# Altium integrated library Francisco_Lib.IntLib: 77 symbols (part 2 of 3)
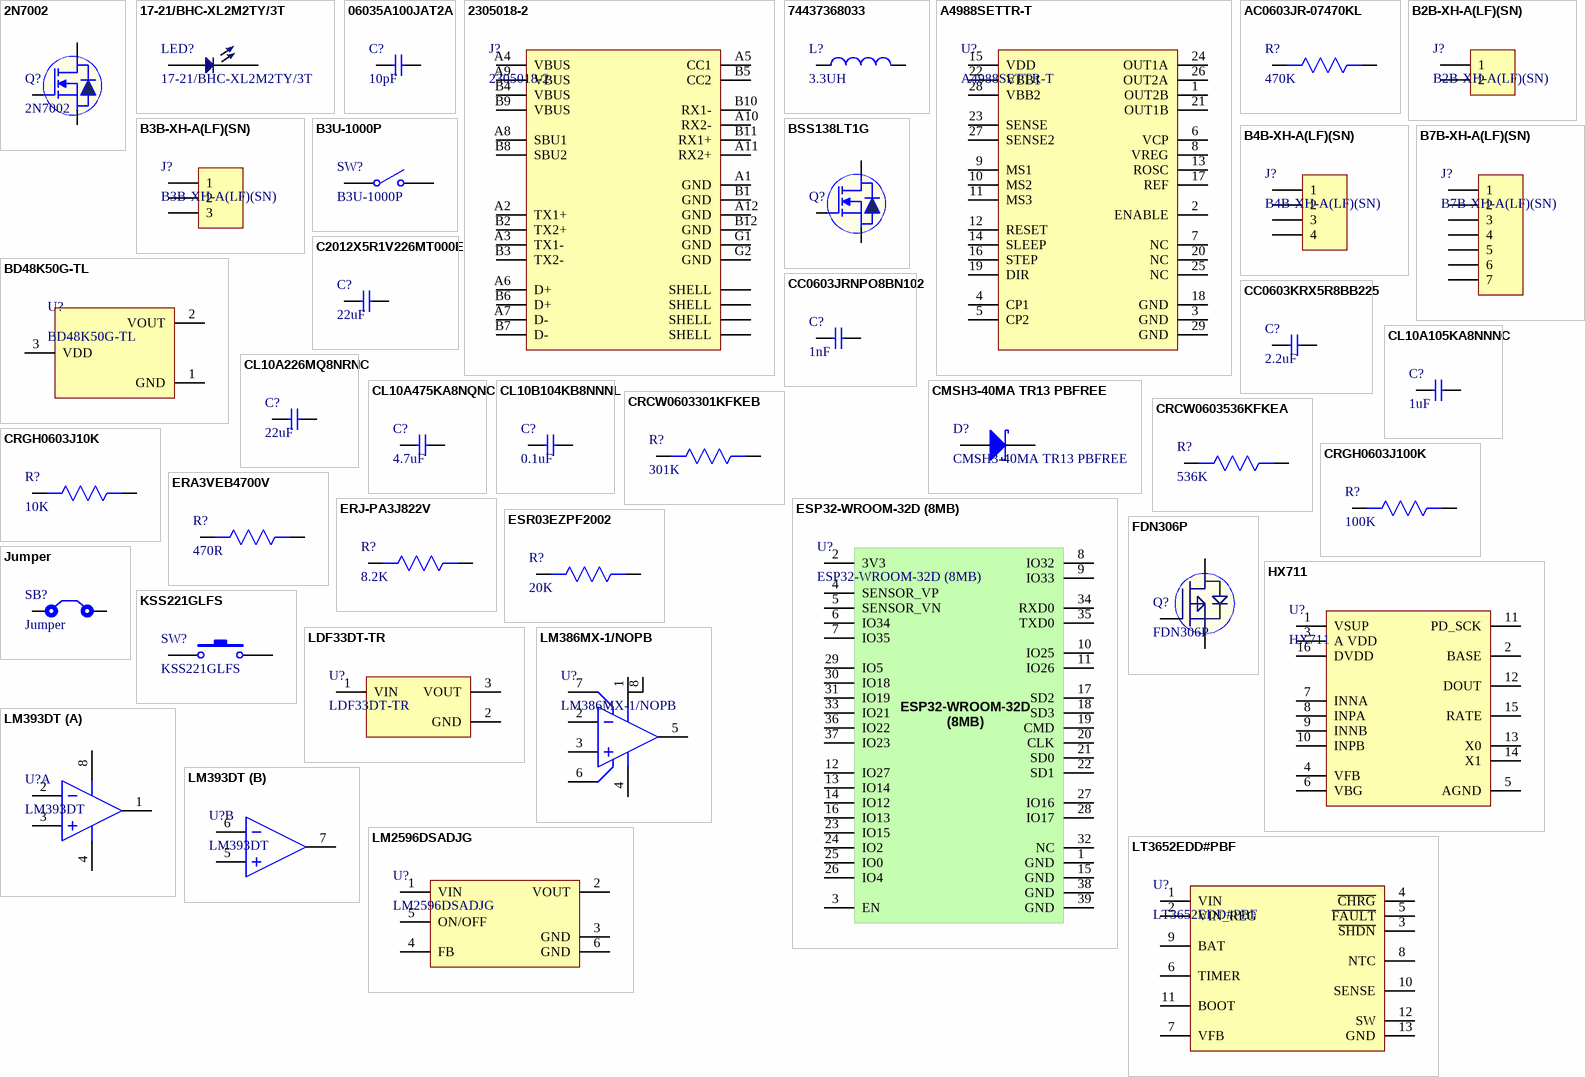
[diagram p2: symbols 2N7002 to LT3652EDD#PBF]

## ESP32-WROOM-32D (8MB)
designator U?
RX TXRX MOD WIFI TRACE ANT SMD; Manufacturer: Espressif Systems; Interface: I2C,SPI,GPIO,PWM,SDIO,UART; Frequency: 2.5GHz; Data Rate: 150Mbps; Sensitivity: -98dBm; Memory Size: 536KB; Supplier 1: Digi-Key; Manufacturer Part Number: ESP32-WROOM-32D (8MB); RoHS: No; Stock 1: 2044; Pricing 1: 1=4.35000 (USD); Mount: Surface Mount; Case/Package: SMD/SMT; Min Operating Temperature: -40°C; Max Operating Temperature: 85°C; Packaging: Tape and Reel; ComponentLink1URL: https://www.espressif.com/sites/default/files/documentation/esp32-wroom-32d_esp32-wroom-32u_datasheet_en.pdf?src-supplier=Digi-Key; ComponentLink1Description: https://www.espressif.com/sites/default/files/documentation/esp32-wroom-32d_esp32-wroom-32u_datasheet_en.pdf?src-supplier=Digi-Key; Supplier Part Number 1: 1904-1024-1-ND
footprint ESP32-WROOM-32D (8MB)
pins: 1 GND, 2 3V3, 3 EN, 4 SENSOR_VP, 5 SENSOR_VN, 6 IO34, 7 IO35, 8 IO32, 9 IO33, 10 IO25, 11 IO26, 12 IO27, 13 IO14, 14 IO12, 15 GND, 16 IO13, 17 SD2, 18 SD3, 19 CMD, 20 CLK, 21 SD0, 22 SD1, 23 IO15, 24 IO2, 25 IO0, 26 IO4, 27 IO16, 28 IO17, 29 IO5, 30 IO18, 31 IO19, 32 NC, 33 IO21, 34 RXD0, 35 TXD0, 36 IO22, 37 IO23, 38 GND, 39 GND
text: ESP32-WROOM-32D (8MB) /

## ESR03EZPF2002
designator R?, comment 20K
RES SMD 20K OHM 1% 1/4W 0603; Manufacturer: Rohm; Manufacturer Part Number: ESR03EZPF2002; Resistance: 20kR; Max Power Dissipation: 250mW; Temperature Coefficient: 100ppm/°C; Supplier 1: Digi-Key; Stock 1: 4737; Pricing 1: 1=0.13, 10=0.12, 100=0.046, 1000=0.02024, 2500=0.01748 (USD); Case/Package: 0603; Case Code (Metric): 1608; Case Code (Imperial): 0603; Min Operating Temperature: -55°C; Max Operating Temperature: 155°C; Package Quantity: 1; Tolerance: 1%; Packaging: Tape and Reel; Resistor Type: Thick Film; Number of Terminations: 2; Features: Automotive AEC-Q200; Series: ESR; Length: 0.063inch; Width: 0.031inch; Height: 0.022inch; RoHS Compliant: Yes; ComponentLink1URL: https://www.rohm.com/datasheet/ESR01MZPF/esr-e?src-supplier=Digi-Key; ComponentLink1Description: https://www.rohm.com/datasheet/ESR01MZPF/esr-e?src-supplier=Digi-Key; Supplier Part Number 1: RHM20.0KADCT-ND
footprint RES-0603
pins: 1, 2

## FDN306P
designator Q?
MOSFET P-CH 12V 2.6A SUPERSOT3; Manufacturer: ON Semiconductor / Fairchild; Rds On Max: 40mR; Input Capacitance: 1.138nF; Max Power Dissipation: 500mW; Gate to Source Voltage (Vgs): 8V; Number of Elements: 1; Turn-Off Delay Time: 38ns; Turn-On Delay Time: 11ns; Element Configuration: Single; Rise Time: 10ns; Threshold Voltage: -600mV; Drain to Source Breakdown Voltage: -12V; Polarity: P-CHANNEL; Current Rating: -2.6A; Current: 26A; Supplier 1: Digi-Key; Manufacturer Part Number: FDN306P; RoHS: Yes; Category: MOSFETs; Stock 1: 12409; Pricing 1: 1=0.59000, 10=0.50700, 25=0.47360, 100=0.37880, 500=0.29766, 1000=0.23001 (USD); Mount: Surface Mount; Case/Package: TO-236-3; Number of Pins: 3; Contact Plating: Tin,Matte; Min Operating Temperature: -55°C; Max Operating Temperature: 150°C; Packaging: Tape and Reel; Package Quantity: 3000; Drain to Source Voltage (Vdss): 12V; Continuous Drain Current (ID): 2.6A; Drain to Source Resistance: 40mR; Power Dissipation: 500mW; Series: PowerTrench®; Fall Time: 10ns; Nominal Vgs: -600mV; On-State Resistance: 40MR; Drain-source On Resistance-Max: 40MR; Dual Supply Voltage: -12V; Termination: SMD/SMT; Voltage Rating (DC): -12V; Voltage: 12V; Length: 2.92mm; Width: 1.4mm; Height: 0.94mm; Radiation Hardening: No; REACH SVHC: No SVHC; RoHS Compliant: Yes; Lead Free: Lead Free; ComponentLink1URL: https://datasheet.ciiva.com/6383/fdn306p-6383301.pdf?src-supplier=Digi-Key; ComponentLink1Description: https://datasheet.ciiva.com/6383/fdn306p-6383301.pdf?src-supplier=Digi-Key; ComponentLink2URL: https://datasheet.ciiva.com/4439/fdn306p-50876-4439911.pdf?src-supplier=Mouser; ComponentLink2Description: https://datasheet.ciiva.com/4439/fdn306p-50876-4439911.pdf?src-supplier=Mouser; ComponentLink3URL: https://datasheet.ciiva.com/27050/889760-27050636.pdf?src-supplier=Jameco; ComponentLink3Description: https://datasheet.ciiva.com/27050/889760-27050636.pdf?src-supplier=Jameco; ComponentLink4URL: https://datasheet.ciiva.com/14170/fdn306p-eng-tds-14170925.pdf?src-supplier=Distrelec; ComponentLink4Description: https://datasheet.ciiva.com/14170/fdn306p-eng-tds-14170925.pdf?src-supplier=Distrelec; ComponentLink5URL: https://datasheet.ciiva.com/22700/264983-22700885.pdf?src-supplier=Element14; ComponentLink5Description: https://datasheet.ciiva.com/22700/264983-22700885.pdf?src-supplier=Element14; ComponentLink6URL: https://datasheet.ciiva.com/26144/fdn306p-26144214.pdf?src-supplier=Avnet+Europe; ComponentLink6Description: https://datasheet.ciiva.com/26144/fdn306p-26144214.pdf?src-supplier=Avnet+Europe; ComponentLink7URL: https://datasheet.ciiva.com/6383/fdn306p-6383304.pdf?src-supplier=Digi-Key; ComponentLink7Description: https://datasheet.ciiva.com/6383/fdn306p-6383304.pdf?src-supplier=Digi-Key; ComponentLink8URL: https://datasheet.ciiva.com/11175/fdn306p-11175160.pdf?src-supplier=Avnet; ComponentLink8Description: https://datasheet.ciiva.com/11175/fdn306p-11175160.pdf?src-supplier=Avnet; ComponentLink9URL: https://datasheet.ciiva.com/6383/fdn306p-6383306.pdf?src-supplier=Digi-Key; ComponentLink9Description: https://datasheet.ciiva.com/6383/fdn306p-6383306.pdf?src-supplier=Digi-Key; ComponentLink10URL: https://datasheet.ciiva.com/17275/fdn306p-17275114.pdf?src-supplier=Future+Electronics; ComponentLink10Description: https://datasheet.ciiva.com/17275/fdn306p-17275114.pdf?src-supplier=Future+Electronics; ComponentLink11URL: https://datasheet.ciiva.com/22655/fdn306p-22655327.pdf?src-supplier=Element14; ComponentLink11Description: https://datasheet.ciiva.com/22655/fdn306p-22655327.pdf?src-supplier=Element14; Supplier Part Number 1: FDN306PCT-ND
footprint SuperSOT-3
pins: 1 G, 2 S, 3 D

## HX711
designator U?
LOAD CELL AMP HX711; Manufacturer Part No: HX711; Package: SOP-16L
footprint HX711
pins: 1 VSUP, 2 BASE, 3 A VDD, 4 VFB, 5 AGND, 6 VBG, 7 INNA, 8 INPA, 9 INNB, 10 INPB, 11 PD_SCK, 12 DOUT, 13 X0, 14 X1, 15 RATE, 16 DVDD

## Jumper
designator SB?
footprint Jumper
pins: 1, 2

## KSS221GLFS
designator SW?
SWITCH TACTILE SPST-NO 0.05A 50V; Manufacturer: ITT C&K; Mechanical Life: 100000Cycles; Throw Configuration: SPST; Operating Force: 2N; Max Current Rating: 50mA; Max Voltage Rating (DC): 32V; Contact Resistance: 100mR; Power Rating: 1W; Illumination Type: Non-Illuminated,Illuminated; Insulation Resistance: 1GR; Switch Travel: 0.3mm; Switch Function: Off-Mom; Actuator Length: 0.8mm; IP Rating: IP40; Supplier 1: Digi-Key; Manufacturer Part Number: KSS221GLFS; Stock 1: 17242; Pricing 1: 1=0.68, 10=0.655, 25=0.6424, 50=0.6182, 100=0.5334, 250=0.4849, 500=0.4607, 1000=0.3637 (USD); Mount: Surface Mount; Contact Material: Silver; Contact Plating: Silver; Min Operating Temperature: -40°C; Max Operating Temperature: 85°C; Termination: Gull Wing; Packaging: Tape and Reel; Package Quantity: 1; Contact Current Rating: 50mA; Current Rating: 50mA; Voltage Rating (DC): 32V; Orientation: Right Angle; Length: 4.5mm; Width: 7mm; Depth: 4.4mm; Radiation Hardening: No; REACH SVHC: No SVHC; Lead Free: Lead Free; ComponentLink1URL: https://datasheet.ciiva.com/26917/getdatasheetpartid-773364-26917575.pdf; ComponentLink1Description: https://datasheet.ciiva.com/26917/getdatasheetpartid-773364-26917575.pdf; ComponentLink2URL: https://datasheet.ciiva.com/30466/0900766b8129cd37-30466697.pdf; ComponentLink2Description: https://datasheet.ciiva.com/30466/0900766b8129cd37-30466697.pdf; ComponentLink3URL: https://datasheet.ciiva.com/16496/kss221g20lfs-16496166.pdf; ComponentLink3Description: https://datasheet.ciiva.com/16496/kss221g20lfs-16496166.pdf; ComponentLink4URL: https://datasheet.ciiva.com/18145/getdatasheetpartid-313005-18145235.pdf; ComponentLink4Description: https://datasheet.ciiva.com/18145/getdatasheetpartid-313005-18145235.pdf; ComponentLink5URL: https://datasheet.ciiva.com/16155/kss221glfs-ckcomponents-16155741.pdf; ComponentLink5Description: https://datasheet.ciiva.com/16155/kss221glfs-ckcomponents-16155741.pdf; ComponentLink6URL: https://datasheet.ciiva.com/5684/19445-5684460.pdf; ComponentLink6Description: https://datasheet.ciiva.com/5684/19445-5684460.pdf; ComponentLink7URL: https://datasheet.ciiva.com/2900/kss-2900345.pdf; ComponentLink7Description: https://datasheet.ciiva.com/2900/kss-2900345.pdf; ComponentLink8URL: https://datasheet.ciiva.com/2900/kss-2900343.pdf; ComponentLink8Description: https://datasheet.ciiva.com/2900/kss-2900343.pdf; ComponentLink9URL: https://datasheet.ciiva.com/7986/19445-7986997.pdf; ComponentLink9Description: https://datasheet.ciiva.com/7986/19445-7986997.pdf; ComponentLink10URL: https://datasheet.ciiva.com/2900/kss-2900344.pdf; ComponentLink10Description: https://datasheet.ciiva.com/2900/kss-2900344.pdf; Supplier Part Number 1: 401-1097-6-ND
footprint KSS221GLFS
pins: 1, 2

## LDF33DT-TR
designator U?
IC REG LINEAR 3.3V 1A DPAK; Manufacturer: STMicroelectronics; Number of Outputs: 1; Min Input Voltage: 2.6V; Max Input Voltage: 16V; Dropout Voltage: 200mV; Polarity: Positive; Quiescent Current: 800uA; Accuracy: 2%; Operating Supply Current: 200uA; Power Supply Rejection Ratio (PSRR): 60dB; Output Type: Fixed; Supplier 1: Digi-Key; Manufacturer Part Number: LDF33DT-TR; Stock 1: 6958; Pricing 1: 1=0.99, 10=0.868, 25=0.8148, 100=0.6178, 250=0.52576, 500=0.49948, 1000=0.434 (USD); Mount: Surface Mount; Case/Package: TO-252-3; Number of Pins: 3; Weight: 0.012346oz; Min Operating Temperature: -40°C; Max Operating Temperature: 125°C; Packaging: Tape and Reel; Max Output Current: 1A; Output Voltage: 3.3V; Nominal Output Voltage: 3.3V; Output Current: 1A; Number of Regulators: 1; Package Quantity: 2500; Radiation Hardening: No; REACH SVHC: No SVHC; Lead Free: Lead Free; RoHS Compliant: Yes; ComponentLink1URL: http://www.st.com/st-web-ui/static/active/en/resource/technical/document/datasheet/DM00099995.pdf?src-supplier=Avnet; ComponentLink1Description: http://www.st.com/st-web-ui/static/active/en/resource/technical/document/datasheet/DM00099995.pdf?src-supplier=Avnet; Supplier Part Number 1: 497-14661-6-ND
footprint LDF33DT-TR
pins: 1 VIN, 2 GND, 3 VOUT

## LM386MX-1/NOPB
designator U?
IC AMP AUDIO PWR .325W AB 8SOIC; Manufacturer: TI National Semiconductor; Min Supply Voltage: 4V; Max Supply Voltage: 12V; Power Supply Rejection Ratio (PSRR): 50dB; Number of Channels: 1; Output Power: 325mW; Voltage Gain: 46dB; Supply Type: Single; Load Impedance: 8R; Operating Supply Voltage: 9V; Max Power Dissipation: 730mW; Nominal Supply Current: 4mA; Gain: 20dB; Input Bias Current: 250nA; Bandwidth: 300kHz; ComponentLink1URL: http://www.ti.com/lit/ds/symlink/lm4673.pdf?src-supplier=Avnet; ComponentLink1Description: http://www.ti.com/lit/ds/symlink/lm4673.pdf?src-supplier=Avnet; ComponentLink2URL: http://www.ti.com/lit/ds/symlink/lm4673.pdf?src-supplier=Digi-Key; ComponentLink2Description: http://www.ti.com/lit/ds/symlink/lm4673.pdf?src-supplier=Digi-Key; ComponentLink3URL: http://www.produktinfo.conrad.com/datenblaetter/1000000-1099999/001071168-da-01-en-IC_AMP_AUDI_PWR_LM4673SD_NOPB_WSON_8_TID.pdf?src-supplier=Conrad; ComponentLink3Description: http://www.produktinfo.conrad.com/datenblaetter/1000000-1099999/001071168-da-01-en-IC_AMP_AUDI_PWR_LM4673SD_NOPB_WSON_8_TID.pdf?src-supplier=Conrad; Supplier 1: Digi-Key; Manufacturer Part Number: LM386MX-1/NOPB; RoHS: Yes; Category: Amplifiers - Audio; Stock 1: 11730; Pricing 1: 1=1.08000, 10=0.96300, 25=0.91400, 100=0.75090, 250=0.70192, 500=0.62032, 1000=0.51436 (USD); Case/Package: D; Number of Pins: 8; Contact Plating: Tin,Matte; Min Operating Temperature: 0°C; Max Operating Temperature: 70°C; Packaging: Tape and Reel; Package Quantity: 2500; Max Output Power: 325mW; Series: LM386; Power Dissipation: 730mW; Supply Current: 4mA; Radiation Hardening: No; REACH SVHC: No SVHC; Lead Free: Lead Free; RoHS Compliant: Yes; ComponentLink4URL: https://datasheet.ciiva.com/27051/1282302-27051816.pdf?src-supplier=Jameco; ComponentLink4Description: https://datasheet.ciiva.com/27051/1282302-27051816.pdf?src-supplier=Jameco; ComponentLink5URL: https://datasheet.ciiva.com/15132/getdatasheetpartid-145250-15132457.pdf?src-supplier=Verical; ComponentLink5Description: https://datasheet.ciiva.com/15132/getdatasheetpartid-145250-15132457.pdf?src-supplier=Verical; ComponentLink6URL: https://datasheet.ciiva.com/1482/1640767-1482306.pdf?src-supplier=Element14; ComponentLink6Description: https://datasheet.ciiva.com/1482/1640767-1482306.pdf?src-supplier=Element14; ComponentLink7URL: https://datasheet.ciiva.com/6625/lm386-6625407.pdf?src-supplier=Digi-Key; ComponentLink7Description: https://datasheet.ciiva.com/6625/lm386-6625407.pdf?src-supplier=Digi-Key; Supplier Part Number 1: LM386MX-1/NOPBCT-ND
footprint LM386MX-1/NOPB
pins: 1 GAIN, 2 IN-, 3 IN+, 4 GND, 5 OUT, 6 VS, 7 Bypass, 8 GAIN

## LM393DT
designator U?
IC COMPARATOR LP DUAL 8-SOIC; Manufacturer: STMicroelectronics; Nominal Supply Current: 1mA; Voltage Gain: 106.02dB; Min Supply Voltage: 2V; Max Supply Voltage: 36V; Min Dual Supply Voltage: 1V; Max Dual Supply Voltage: 18V; Number of Channels: 2; Output Current: 18mA; Quiescent Current: 2.5mA; Input Offset Voltage (Vos): 5mV; Input Bias Current: 250nA; Output Current per Channel: 100pA; Response Time: 1.3us; Output Type: TTL; Operating Supply Voltage: 28V; Dual Supply Voltage: 9V; Max Power Dissipation: 710mW; Natural Thermal Resistance: 125°C/W; Supplier 1: Digi-Key; Manufacturer Part Number: LM393DT; Stock 1: 46251; Pricing 1: 1=0.48, 10=0.358, 25=0.3136, 100=0.1792, 250=0.168, 500=0.1344, 1000=0.10304 (USD); Mount: Surface Mount; Case/Package: SO; Number of Pins: 8; Weight: 0.01lb; Contact Plating: Gold; Min Operating Temperature: 0°C; Max Operating Temperature: 70°C; Packaging: Tape and Reel; Package Quantity: 2500; Number of Elements: 2; Max Supply Current: 1mA; Max Input Current: 250nA; Type: General Purpose; Propagation Delay: 1.3us; Turn-On Delay Time: 1.3us; Length: 4.9mm; Height: 1.25mm; Width: 3.9mm; Radiation Hardening: No; REACH SVHC: No SVHC; Lead Free: Lead Free; ComponentLink1URL: http://www.st.com/content/ccc/resource/technical/document/datasheet/group1/b4/cc/cf/13/18/28/44/f5/CD00000465/files/CD00000465.pdf/jcr:content/translations/en.CD00000465.pdf?src-supplier=Digi-Key; ComponentLink1Description: http://www.st.com/content/ccc/resource/technical/document/datasheet/group1/b4/cc/cf/13/18/28/44/f5/CD00000465/files/CD00000465.pdf/jcr:content/translations/en.CD00000465.pdf?src-supplier=Digi-Key; ComponentLink2URL: https://www.verical.com/server-webapp/html/getDatasheet?partID=302604&src-supplier=Verical; ComponentLink2Description: https://www.verical.com/server-webapp/html/getDatasheet?partID=302604&src-supplier=Verical; ComponentLink3URL: http://www.st.com/st-web-ui/static/active/en/resource/technical/document/datasheet/CD00000465.pdf?src-supplier=Avnet; ComponentLink3Description: http://www.st.com/st-web-ui/static/active/en/resource/technical/document/datasheet/CD00000465.pdf?src-supplier=Avnet; ComponentLink4URL: http://www.mouser.com/ds/2/389/lm193-955038.pdf?src-supplier=Mouser; ComponentLink4Description: http://www.mouser.com/ds/2/389/lm193-955038.pdf?src-supplier=Mouser; ComponentLink5URL: http://www.farnell.com/datasheets/2291162.pdf?src-supplier=Element14; ComponentLink5Description: http://www.farnell.com/datasheets/2291162.pdf?src-supplier=Element14; ComponentLink6URL: https://www.distrelec.biz/Web/Downloads/_e/ng/LM393_ST_tds_eng.pdf?mime=application%2Fpdf&src-supplier=Distrelec; ComponentLink6Description: https://www.distrelec.biz/Web/Downloads/_e/ng/LM393_ST_tds_eng.pdf?mime=application%2Fpdf&src-supplier=Distrelec; ComponentLink7URL: http://www.st.com/web/en/resource/technical/document/datasheet/CD00000465.pdf?src-supplier=Future+Electronics; ComponentLink7Description: http://www.st.com/web/en/resource/technical/document/datasheet/CD00000465.pdf?src-supplier=Future+Electronics; ComponentLink8URL: http://datasheet.iiic.cc/stmicroelectronics/LM393DT.pdf?src-supplier=IIIC; ComponentLink8Description: http://datasheet.iiic.cc/stmicroelectronics/LM393DT.pdf?src-supplier=IIIC; Supplier Part Number 1: 497-1593-1-ND
footprint LM393DT
part A pins: 1 OUT1, 2 IN1-, 3 IN1+, 4 V- (power), 8 V+ (power)
part B pins: 5 IN2+, 6 IN2-, 7 OUT2

## LM2596DSADJG
designator U?
IC REG MULT CONFG ADJ 3A D2PAK-5; Manufacturer: ON Semiconductor; Max Input Voltage: 40V; Output Voltage: 37V; Number of Outputs: 1; Efficiency: 73%; Min Input Voltage: 4.5V; Switching Frequency: 150kHz; Synchronous Rectifier: No; Min Output Voltage: 1.23V; Output Type: Adjustable; Supplier 1: Digi-Key; Manufacturer Part Number: LM2596DSADJG; Stock 1: 0; Pricing 1: 1=2.49, 10=2.237, 25=2.11, 100=1.7979, 250=1.68816, 500=1.47714, 1000=1.22391, 2500=1.19445 (USD); Mount: Surface Mount; Case/Package: TO-263-5; Number of Pins: 5; Contact Plating: Tin,Matte; Weight: 0.070548oz; Min Operating Temperature: -40°C; Max Operating Temperature: 125°C; Output Current: 3A; Package Quantity: 50; Packaging: Rail/Tube; Max Output Current: 3A; Max Output Voltage: 37V; Operating Supply Voltage: 40V; Series: LM2596; Length: 10.24mm; Width: 4.572mm; Height: 9.347mm; Radiation Hardening: No; REACH SVHC: No SVHC; Lead Free: Lead Free; Halogen Free: Halogen Free; RoHS Compliant: Yes; ComponentLink1URL: http://www.mouser.com/ds/2/308/LM2596-D-106251.pdf?src-supplier=Mouser; ComponentLink1Description: http://www.mouser.com/ds/2/308/LM2596-D-106251.pdf?src-supplier=Mouser; ComponentLink2URL: http://www.onsemi.com/pub_link/Collateral/LM2596-D.PDF?src-supplier=Digi-Key; ComponentLink2Description: http://www.onsemi.com/pub_link/Collateral/LM2596-D.PDF?src-supplier=Digi-Key; Supplier Part Number 1: LM2596DSADJGOS-ND
footprint LM2596DSADJG
pins: 1 VIN, 2 VOUT, 3 GND, 4 FB, 5 ON/OFF, 6 GND

## LT3652EDD#PBF
designator U?
Battery Charger Li-Ion 2000mA 4.2V Automotive 12-Pin DFN EP; Manufacturer: Analog Devices / Linear Technology; Max Supply Voltage: 32V; Min Supply Voltage: 4.95V; Output Current: 2mA; Max Output Current: 2A; ComponentLink1URL: http://www.mouser.com/ds/2/445/7447779122-538892.pdf?src-supplier=Mouser; ComponentLink1Description: http://www.mouser.com/ds/2/445/7447779122-538892.pdf?src-supplier=Mouser; ComponentLink2URL: http://katalog.we-online.de/pbs/datasheet/7447779122.pdf?src-supplier=Digi-Key; ComponentLink2Description: http://katalog.we-online.de/pbs/datasheet/7447779122.pdf?src-supplier=Digi-Key; Supplier 1: Digi-Key; Manufacturer Part Number: LT3652EDD#PBF; RoHS: Yes; Category: Battery Management; Stock 1: 1554; Pricing 1: 1=7.32000, 10=6.60900, 25=6.30160, 100=5.47170, 250=5.22580, 500=4.76470, 1000=4.35000 (USD); Mount: Surface Mount; Case/Package: DFN; Number of Pins: 12; Min Operating Temperature: -40°C; Max Operating Temperature: 125°C; Package Quantity: 121; Packaging: Rail/Tube; Series: -; Output Voltage: 4.2V; Max Output Voltage: 4.2V; Max Charge Current: 2A; Length: 3mm; Width: 3mm; Height: 0.7mm; Radiation Hardening: No; REACH SVHC: No SVHC; RoHS Compliant: Yes; ComponentLink3URL: https://datasheet.ciiva.com/1138/1692510-1138257.pdf?src-supplier=Element14; ComponentLink3Description: https://datasheet.ciiva.com/1138/1692510-1138257.pdf?src-supplier=Element14; ComponentLink4URL: https://datasheet.ciiva.com/14093/lt3652-eng-ds-14093922.pdf?src-supplier=Distrelec; ComponentLink4Description: https://datasheet.ciiva.com/14093/lt3652-eng-ds-14093922.pdf?src-supplier=Distrelec; ComponentLink5URL: https://datasheet.ciiva.com/15114/getdatasheetpartid-368876-15114676.pdf?src-supplier=Verical; ComponentLink5Description: https://datasheet.ciiva.com/15114/getdatasheetpartid-368876-15114676.pdf?src-supplier=Verical; ComponentLink6URL: https://datasheet.ciiva.com/30477/0900766b812525a8-30477820.pdf?src-supplier=RSComponents; ComponentLink6Description: https://datasheet.ciiva.com/30477/0900766b812525a8-30477820.pdf?src-supplier=RSComponents; ComponentLink7URL: https://datasheet.ciiva.com/1144/3652fd-1144158.pdf?src-supplier=Newark; ComponentLink7Description: https://datasheet.ciiva.com/1144/3652fd-1144158.pdf?src-supplier=Newark; ComponentLink8URL: https://datasheet.ciiva.com/26874/lt3652edd-pbf-26874578.pdf?src-supplier=IIIC; ComponentLink8Description: https://datasheet.ciiva.com/26874/lt3652edd-pbf-26874578.pdf?src-supplier=IIIC; ComponentLink9URL: https://datasheet.ciiva.com/1496/1692510-1496793.pdf?src-supplier=Farnell; ComponentLink9Description: https://datasheet.ciiva.com/1496/1692510-1496793.pdf?src-supplier=Farnell; ComponentLink10URL: https://datasheet.ciiva.com/22642/1684150-22642988.pdf?src-supplier=Element14; ComponentLink10Description: https://datasheet.ciiva.com/22642/1684150-22642988.pdf?src-supplier=Element14; ComponentLink11URL: https://datasheet.ciiva.com/22647/1692510-22647788.pdf?src-supplier=Farnell; ComponentLink11Description: https://datasheet.ciiva.com/22647/1692510-22647788.pdf?src-supplier=Farnell; ComponentLink12URL: https://datasheet.ciiva.com/1932/28522-1932094.pdf?src-supplier=Digi-Key; ComponentLink12Description: https://datasheet.ciiva.com/1932/28522-1932094.pdf?src-supplier=Digi-Key; Supplier Part Number 1: LT3652EDD#PBF-ND
footprint LT3652EDD#PBF
pins: 1 VIN, 2 VIN_REG, 3 ~{SHDN}, 4 ~{CHRG}, 5 ~{FAULT}, 6 TIMER, 7 VFB, 8 NTC, 9 BAT, 10 SENSE, 11 BOOT, 12 SW, 13 GND

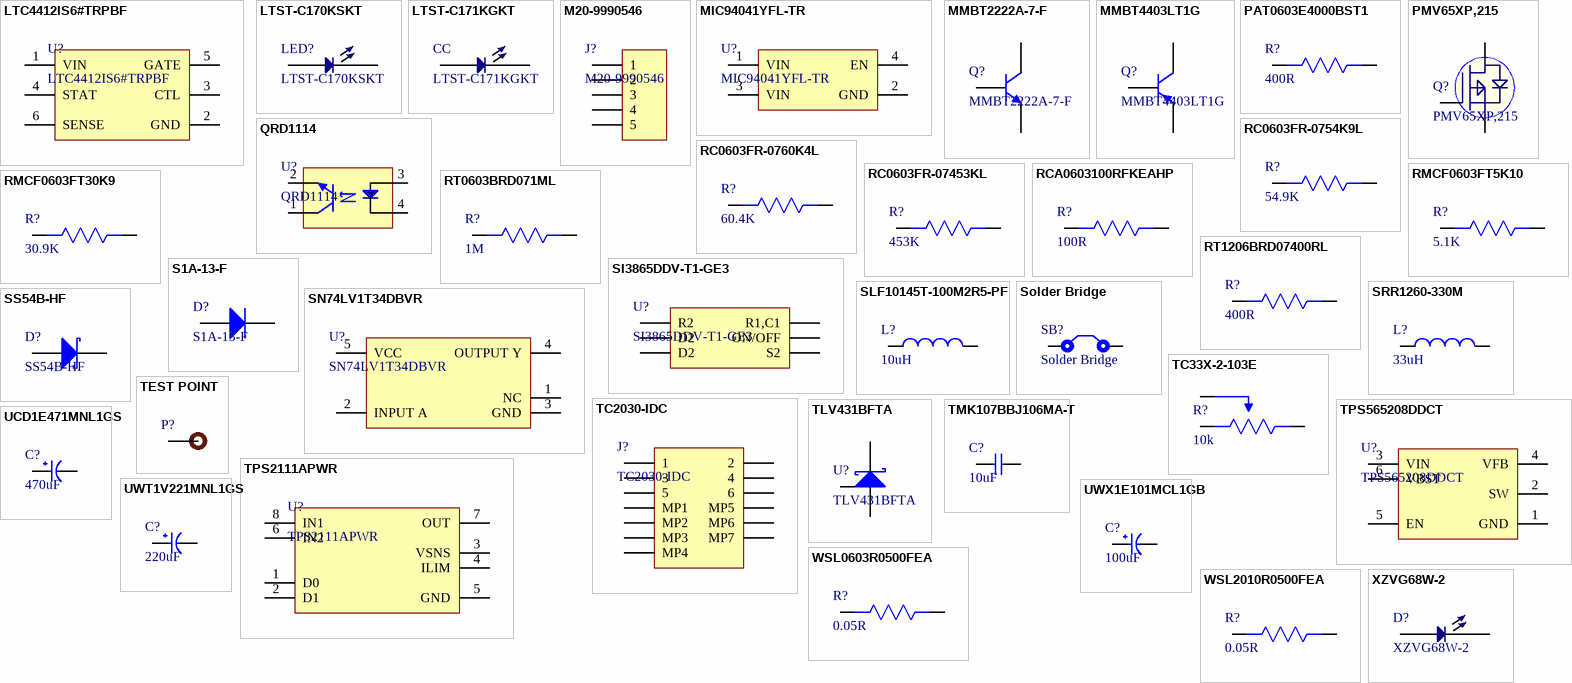
[diagram p1: symbols LTC4412IS6#TRPBF to XZVG68W-2]

## LTC4412IS6#TRPBF
designator U?
IC OR CTRLR SRC SELECT TSOT23-6; Manufacturer: Analog Devices / Linear Technology; Turn-On Delay Time: 110us; Turn-Off Delay Time: 13us; Operating Supply Current: 15uA; Supplier 1: Digi-Key; Manufacturer Part Number: LTC4412IS6#TRPBF; RoHS: Yes; Category: Uncategorized; Stock 1: 2608; Pricing 1: 1=3.90000, 10=3.50700, 25=3.31520, 100=2.87310, 250=2.72580, 500=2.44584, 1000=2.08500 (USD); Case/Package: SOT-23-6; Number of Pins: 6; Min Operating Temperature: -40°C; Max Operating Temperature: 85°C; Package Quantity: 2500; Packaging: Tape and Reel; Series: PowerPath™; Length: 2.9mm; RoHS Compliant: Yes; ComponentLink1URL: https://datasheet.ciiva.com/1960/1527-1960891.pdf?src-supplier=Digi-Key; ComponentLink1Description: https://datasheet.ciiva.com/1960/1527-1960891.pdf?src-supplier=Digi-Key; Supplier Part Number 1: LTC4412IS6#TRPBFCT-ND
footprint TSOT-23-6
pins: 1 VIN, 2 GND, 3 CTL, 4 STAT, 5 GATE, 6 SENSE

## LTST-C170KSKT
designator LED?
Yellow 2 x 1.25 x 1.1 mm 130° Water Clear 112 mcd 1.8 V LED Surface Mount; Manufacturer: Vishay Lite-On; Lens Color: Colorless; Forward Voltage: 2.4V; Forward Current: 30mA; Luminous Intensity: 112mcd; Lens Style: Diffused,Colorless,Rectangular,Clear; Power Rating: 75mW; Dominant Wavelength: 587nm; Test Current: 20mA; Number of Elements: 1; Wavelength: 588nm; Reverse Voltage: 5V; Supplier 1: Digi-Key; Manufacturer Part Number: LTST-C170KSKT; RoHS: Yes; Category: LEDs; Stock 1: 4224; Pricing 1: 1=0.31000, 10=0.16900, 100=0.07860, 500=0.07260, 1000=0.05687 (USD); Mount: Surface Mount; Case/Package: 0805; Number of Pins: 2; Color: Yellow; Case Code (Metric): 2012; Case Code (Imperial): 0805; Min Operating Temperature: -55°C; Max Operating Temperature: 85°C; Packaging: Tape and Reel; Viewing Angle: 130°; Package Quantity: 1; Illumination Color: Yellow; Lens Transparency: Clear; Power Dissipation: 75mW; Number of LEDs: 1; Series: CHIPLED 0805; Length: 2mm; Width: 1.25mm; Height: 1.1mm; Depth: 1.25mm; Radiation Hardening: No; Lead Free: Lead Free; RoHS Compliant: Yes; ComponentLink1URL: https://datasheet.ciiva.com/11774/0900766b80dc027c-11774116.pdf?src-supplier=RSComponents; ComponentLink1Description: https://datasheet.ciiva.com/11774/0900766b80dc027c-11774116.pdf?src-supplier=RSComponents; ComponentLink2URL: https://datasheet.ciiva.com/12400/lite-on-ltst-c170kskt-187240-12400806.pdf?src-supplier=Mouser; ComponentLink2Description: https://datasheet.ciiva.com/12400/lite-on-ltst-c170kskt-187240-12400806.pdf?src-supplier=Mouser; ComponentLink3URL: https://datasheet.ciiva.com/16203/ltst-c170kskt-16203829.pdf?src-supplier=Future+Electronics; ComponentLink3Description: https://datasheet.ciiva.com/16203/ltst-c170kskt-16203829.pdf?src-supplier=Future+Electronics; ComponentLink4URL: https://datasheet.ciiva.com/15118/getdatasheetpartid-214541-15118098.pdf?src-supplier=Verical; ComponentLink4Description: https://datasheet.ciiva.com/15118/getdatasheetpartid-214541-15118098.pdf?src-supplier=Verical; ComponentLink5URL: https://datasheet.ciiva.com/2110/s-110-ltst-c170kskt-2110046.pdf?src-supplier=Digi-Key; ComponentLink5Description: https://datasheet.ciiva.com/2110/s-110-ltst-c170kskt-2110046.pdf?src-supplier=Digi-Key; ComponentLink6URL: https://datasheet.ciiva.com/2110/s-110-ltst-c170kskt-2110045.pdf?src-supplier=Digi-Key; ComponentLink6Description: https://datasheet.ciiva.com/2110/s-110-ltst-c170kskt-2110045.pdf?src-supplier=Digi-Key; ComponentLink7URL: https://datasheet.ciiva.com/2110/s-110-ltst-c170kskt-2110047.pdf?src-supplier=Digi-Key; ComponentLink7Description: https://datasheet.ciiva.com/2110/s-110-ltst-c170kskt-2110047.pdf?src-supplier=Digi-Key; Supplier Part Number 1: 160-1416-1-ND
footprint LTST-C170KSKT (Yellow 0805 Light Emitting Diodes (LED) ROHS)
pins: 1, 2

## LTST-C171KGKT
designator CC
LED GREEN 574nm 2-Pin Chip 0805 SMD; Manufacturer: Vishay Lite-On; Lens Color: Colorless; Viewing Angle: 130°; Lens Style: Rectangular,Diffused,Colorless,Clear; Forward Voltage: 2.4V; Forward Current: 30mA; Luminous Intensity: 35mcd; Dominant Wavelength: 571nm; Test Current: 20mA; Lens Transparency: Clear; Number of Elements: 1; Power Dissipation: 75mW; Reverse Voltage: 5V; Supplier 1: RSComponents; Manufacturer Part Number: LTST-C171KGKT; RoHS: Yes; Category: LEDs; Stock 1: 14250; Pricing 1: 250=0.05900, 500=0.05000, 1250=0.04200, 2500=0.03900 (GBP); Mount: Surface Mount; Case/Package: 0805; Number of Pins: 2; Color: Green; Case Code (Metric): 2012; Case Code (Imperial): 0805; Min Operating Temperature: -55°C; Max Operating Temperature: 85°C; Packaging: Tape and Reel; Package Quantity: 1; Illumination Color: Green; Wavelength: 574nm; Number of LEDs: 1; Power Rating: 75mW; Series: CHIPLED 0805; Length: 2mm; Width: 1.25mm; Height: 0.8mm; Depth: 1.25mm; Radiation Hardening: No; Lead Free: Lead Free; RoHS Compliant: Yes; ComponentLink1URL: https://datasheet.ciiva.com/11774/0900766b80dc0298-11774377.pdf?src-supplier=RSComponents; ComponentLink1Description: https://datasheet.ciiva.com/11774/0900766b80dc0298-11774377.pdf?src-supplier=RSComponents; ComponentLink2URL: https://datasheet.ciiva.com/12400/lite-on-ltst-c171kgkt-187692-12400799.pdf?src-supplier=Mouser; ComponentLink2Description: https://datasheet.ciiva.com/12400/lite-on-ltst-c171kgkt-187692-12400799.pdf?src-supplier=Mouser; ComponentLink3URL: https://datasheet.ciiva.com/16200/lite-on20ltst-c171kgkt-16200100.pdf?src-supplier=Future+Electronics; ComponentLink3Description: https://datasheet.ciiva.com/16200/lite-on20ltst-c171kgkt-16200100.pdf?src-supplier=Future+Electronics; ComponentLink4URL: https://datasheet.ciiva.com/15118/getdatasheetpartid-214542-15118099.pdf?src-supplier=Verical; ComponentLink4Description: https://datasheet.ciiva.com/15118/getdatasheetpartid-214542-15118099.pdf?src-supplier=Verical; ComponentLink5URL: https://datasheet.ciiva.com/2110/s-110-ltst-c171kgkt-2110073.pdf?src-supplier=Digi-Key; ComponentLink5Description: https://datasheet.ciiva.com/2110/s-110-ltst-c171kgkt-2110073.pdf?src-supplier=Digi-Key; ComponentLink6URL: https://datasheet.ciiva.com/2110/s-110-ltst-c171kgkt-2110072.pdf?src-supplier=Digi-Key; ComponentLink6Description: https://datasheet.ciiva.com/2110/s-110-ltst-c171kgkt-2110072.pdf?src-supplier=Digi-Key; ComponentLink7URL: https://datasheet.ciiva.com/2110/s-110-ltst-c171kgkt-2110074.pdf?src-supplier=Digi-Key; ComponentLink7Description: https://datasheet.ciiva.com/2110/s-110-ltst-c171kgkt-2110074.pdf?src-supplier=Digi-Key; Supplier Part Number 1: 6920947P
footprint LED 0805 (SMD 0805)
pins: 1, 2

## M20-9990546
designator J?
HEADER, 1ROW, 5WAY; Manufacturer: Harwin; Number of Contacts: 5; Connector Type: Male Pin; Gender: Male; Insulation Resistance: 10GR; Max Current Rating: 3A; Contact Resistance: 30mR; Pitch: 2.54mm; Supplier 1: Digi-Key; Manufacturer Part Number: M20-9990546; RoHS: Yes; Category: Headers and Wire Housings; Stock 1: 45711; Pricing 1: 1=0.21000, 10=0.19700, 100=0.13660, 500=0.11554, 1000=0.09454, 5000=0.08403, 10000=0.07615 (USD); Mount: Through Hole; Case/Package: SIL; Housing Material: Nylon; Contact Material: Brass,Bronze; Contact Plating: Tin; Color: Black; Housing Color: Black; Min Operating Temperature: -40°C; Max Operating Temperature: 105°C; Termination: Solder; Number of Rows: 1; Number of Positions: 5; Current Rating: 3A; Package Quantity: 1000; Packaging: Bulk; Orientation: Straight; Length: 12.7mm; Contact Mating Length: 0.24inch; Depth: 2.54mm; REACH SVHC: No SVHC; ComponentLink1URL: https://datasheet.ciiva.com/11749/0900766b80da602d-11749062.pdf?src-supplier=RSComponents; ComponentLink1Description: https://datasheet.ciiva.com/11749/0900766b80da602d-11749062.pdf?src-supplier=RSComponents; ComponentLink2URL: https://datasheet.ciiva.com/8046/315376-8046940.pdf?src-supplier=Element14; ComponentLink2Description: https://datasheet.ciiva.com/8046/315376-8046940.pdf?src-supplier=Element14; ComponentLink3URL: https://datasheet.ciiva.com/6833/m20-999-6833320.pdf?src-supplier=Digi-Key; ComponentLink3Description: https://datasheet.ciiva.com/6833/m20-999-6833320.pdf?src-supplier=Digi-Key; Supplier Part Number 1: 952-2268-ND
footprint M20-9990546
pins: 1, 2, 3, 4, 5

## MIC94041YFL-TR
designator U?
IC PWR SWITCH P-CHAN 1:1 4MLF; Manufacturer: Microchip; Manufacturer Part Number: MIC94041YFLTR; Supplier 1: Farnell; RoHS: Yes; Category: Hot Swap Controllers; Pricing 1: 1=0.52000, 10=0.43200, 50=0.42500, 100=0.41800 (GBP); ComponentLink1URL: https://datasheet.ciiva.com/1955/mic9404x-1955840.pdf?src-supplier=Digi-Key; ComponentLink1Description: https://datasheet.ciiva.com/1955/mic9404x-1955840.pdf?src-supplier=Digi-Key; ComponentLink2URL: https://datasheet.ciiva.com/1955/mic9404x-1955841.pdf?src-supplier=Digi-Key; ComponentLink2Description: https://datasheet.ciiva.com/1955/mic9404x-1955841.pdf?src-supplier=Digi-Key; ComponentLink3URL: https://datasheet.ciiva.com/1955/mic9404x-1955839.pdf?src-supplier=Digi-Key; ComponentLink3Description: https://datasheet.ciiva.com/1955/mic9404x-1955839.pdf?src-supplier=Digi-Key; Supplier Part Number 1: 2219156
footprint MIC94041YFL-TR
pins: 1 VIN, 2 GND, 3 VIN, 4 EN

## MMBT2222A-7-F
designator Q?
TRANS NPN 40V 0.6A SMD SOT23-3; Manufacturer: Diodes; Max Power Dissipation: 300mW; Collector Base Voltage (VCBO): 75V; Max Collector Current: 600mA; hFE Min: 100; Frequency: 300MHz; Number of Elements: 1; Emitter Base Voltage (VEBO): 6V; Collector Emitter Saturation Voltage: 1V; Power Dissipation: 350mW; Element Configuration: Single; Current: 1A; Supplier 1: Digi-Key; Manufacturer Part Number: MMBT2222A-7-F; Stock 1: 2471182; Pricing 1: 1=0.15, 10=0.134, 100=0.0729, 500=0.04486, 1000=0.03059 (USD); Mount: Surface Mount; Case/Package: SOT-23; Number of Pins: 3; Weight: 0.000282oz; Contact Plating: Matte,Tin; Min Operating Temperature: -55°C; Max Operating Temperature: 150°C; Packaging: Tape and Reel; Collector Emitter Voltage (VCEO): 40V; Polarity: NPN; Voltage Rating (DC): 40V; Package Quantity: 3000; Continuous Collector Current: 600mA; Collector Emitter Breakdown Voltage: 40V; Transition Frequency: 300MHz; Max Breakdown Voltage: 40V; Max Frequency: 300MHz; Termination: SMD/SMT; Gain Bandwidth Product: 300MHz; Current Rating: 600mA; Voltage: 40V; Length: 3.05mm; Height: 1mm; Width: 1.4mm; Radiation Hardening: No; Lead Free: Lead Free; REACH SVHC: No SVHC; ComponentLink1URL: http://www.diodes.com/datasheets/ds30041.pdf?src-supplier=Future+Electronics; ComponentLink1Description: http://www.diodes.com/datasheets/ds30041.pdf?src-supplier=Future+Electronics; ComponentLink2URL: http://www.diodes.com/datasheets/ds30041.pdf?src-supplier=Avnet; ComponentLink2Description: http://www.diodes.com/datasheets/ds30041.pdf?src-supplier=Avnet; ComponentLink3URL: https://www.verical.com/server-webapp/html/getDatasheet?partID=82692&src-supplier=Verical; ComponentLink3Description: https://www.verical.com/server-webapp/html/getDatasheet?partID=82692&src-supplier=Verical; ComponentLink4URL: https://www.diodes.com/assets/Datasheets/ds30041.pdf?src-supplier=Digi-Key; ComponentLink4Description: https://www.diodes.com/assets/Datasheets/ds30041.pdf?src-supplier=Digi-Key; ComponentLink5URL: http://www.diodes.com/datasheets/ds30041.pdf?src-supplier=Avnet+Europe; ComponentLink5Description: http://www.diodes.com/datasheets/ds30041.pdf?src-supplier=Avnet+Europe; ComponentLink6URL: http://www.diodes.com/datasheets/ds30041.pdf?src-supplier=Element14; ComponentLink6Description: http://www.diodes.com/datasheets/ds30041.pdf?src-supplier=Element14; Supplier Part Number 1: MMBT2222A-FDIDKR-ND
footprint sot-23
pins: 1 B, 2 E, 3 C

## MMBT4403LT1G
designator Q?
TRANS PNP 40V 600MA SOT23-3; Manufacturer: ON Semiconductor; Max Power Dissipation: 300mW; hFE Min: 30; Emitter Base Voltage (VEBO): 5V; Transition Frequency: 200MHz; Collector Emitter Saturation Voltage: -750mV; Element Configuration: Single; Voltage Rating (DC): -40V; Current Rating: -600mA; Collector-emitter Voltage-Max: 750mV; Number of Elements: 1; ComponentLink1URL: http://www.onsemi.com/pub/Collateral/MMBT4403LT1-D.PDF?src-supplier=Avnet; ComponentLink1Description: http://www.onsemi.com/pub/Collateral/MMBT4403LT1-D.PDF?src-supplier=Avnet; ComponentLink2URL: http://www.onsemi.com/pub/Collateral/MMBT4403LT1-D.PDF?src-supplier=Digi-Key; ComponentLink2Description: http://www.onsemi.com/pub/Collateral/MMBT4403LT1-D.PDF?src-supplier=Digi-Key; Supplier 1: Avnet; Manufacturer Part Number: MMBT4403LT1G; RoHS: Yes; Category: BJTs; Stock 1: 25249; Pricing 1: 1=0.14200, 10=0.09900, 100=0.05400, 500=0.04300 (USD); Case/Package: SOT-23-3; Number of Pins: 3; Contact Plating: Tin,Matte; Min Operating Temperature: -55°C; Max Operating Temperature: 150°C; Packaging: Tape and Reel; Polarity: PNP; Collector Emitter Breakdown Voltage: 40V; Package Quantity: 1; Collector Emitter Voltage (VCEO): 40V; Max Collector Current: 600mA; Collector Base Voltage (VCBO): 40V; Power Dissipation: 300mW; Gain Bandwidth Product: 200MHz; Max Frequency: 200MHz; Series: -; Frequency: 200MHz; Max Breakdown Voltage: 40V; Length: 3.04mm; Width: 1.4mm; Height: 1.01mm; Radiation Hardening: No; Lead Free: Lead Free; REACH SVHC: No SVHC; RoHS Compliant: Yes; ComponentLink3URL: https://datasheet.ciiva.com/4722/mmbt4403lt1-d-101652-4722132.pdf?src-supplier=Mouser; ComponentLink3Description: https://datasheet.ciiva.com/4722/mmbt4403lt1-d-101652-4722132.pdf?src-supplier=Mouser; ComponentLink4URL: https://datasheet.ciiva.com/15138/getdatasheetpartid-44367-15138750.pdf?src-supplier=Verical; ComponentLink4Description: https://datasheet.ciiva.com/15138/getdatasheetpartid-44367-15138750.pdf?src-supplier=Verical; ComponentLink5URL: https://datasheet.ciiva.com/14546/70099534-14546501.pdf?src-supplier=Allied+Electronics; ComponentLink5Description: https://datasheet.ciiva.com/14546/70099534-14546501.pdf?src-supplier=Allied+Electronics; ComponentLink6URL: https://datasheet.ciiva.com/7972/mmbt4403lt1-d-7972391.pdf?src-supplier=Element14; ComponentLink6Description: https://datasheet.ciiva.com/7972/mmbt4403lt1-d-7972391.pdf?src-supplier=Element14; ComponentLink7URL: https://datasheet.ciiva.com/11198/mmbt4403lt1-d-11198713.pdf?src-supplier=Avnet; ComponentLink7Description: https://datasheet.ciiva.com/11198/mmbt4403lt1-d-11198713.pdf?src-supplier=Avnet; ComponentLink8URL: https://datasheet.ciiva.com/16478/mmbt4403lt1-d-16478554.pdf?src-supplier=Avnet+Asia; ComponentLink8Description: https://datasheet.ciiva.com/16478/mmbt4403lt1-d-16478554.pdf?src-supplier=Avnet+Asia; ComponentLink9URL: https://datasheet.ciiva.com/976/mmbt4403lt1-d-976347.pdf?src-supplier=Digi-Key; ComponentLink9Description: https://datasheet.ciiva.com/976/mmbt4403lt1-d-976347.pdf?src-supplier=Digi-Key; ComponentLink10URL: https://datasheet.ciiva.com/16396/mmbt4403lt1-d-16396635.pdf?src-supplier=Future+Electronics; ComponentLink10Description: https://datasheet.ciiva.com/16396/mmbt4403lt1-d-16396635.pdf?src-supplier=Future+Electronics; ComponentLink11URL: https://datasheet.ciiva.com/976/mmbt4403lt1-d-976348.pdf?src-supplier=Digi-Key; ComponentLink11Description: https://datasheet.ciiva.com/976/mmbt4403lt1-d-976348.pdf?src-supplier=Digi-Key; ComponentLink12URL: https://datasheet.ciiva.com/976/mmbt4403lt1-d-976349.pdf?src-supplier=Digi-Key; ComponentLink12Description: https://datasheet.ciiva.com/976/mmbt4403lt1-d-976349.pdf?src-supplier=Digi-Key; ComponentLink13URL: https://datasheet.ciiva.com/25998/mmbt4403lt1-d-25998110.pdf?src-supplier=Avnet+Europe; ComponentLink13Description: https://datasheet.ciiva.com/25998/mmbt4403lt1-d-25998110.pdf?src-supplier=Avnet+Europe; Supplier Part Number 1: 88H4792
footprint sot-23
pins: 1 B, 2 E, 3 C

## PAT0603E4000BST1
designator R?, comment 400R
RES SMD 400 OHM 0.1% 0.15W 0603; Manufacturer: Vishay Dale Thin Film; Manufacturer Part Number: PAT0603E4000BST1; Power Rating: 150mW; Voltage Rating: 75V; Temperature Coefficient: 25ppm/°C; Supplier 1: Digi-Key; Stock 1: 0; Pricing 1: 1=0.84, 10=0.726, 100=0.506 (USD); Case/Package: 0603; Case Code (Imperial): 0603; Case Code (Metric): 1608; Min Operating Temperature: -55°C; Max Operating Temperature: 155°C; Resistance: 400R; Tolerance: 0.1%; Packaging: Tape and Reel; Package Quantity: 1; Termination: SMD/SMT; Resistor Type: Thin Film; Number of Terminations: 2; Max Power Dissipation: 150mW; Features: Moisture Resistant,Automotive AEC-Q200,Anti-Sulfur; Series: PAT; Construction: Rectangular; Length: 0.064inch; Width: 0.762mm; Height: 0.018inch; Depth: 0.81mm; Military Standard: Not; ComponentLink1URL: http://www.vishay.com/docs/60024/pat.pdf?src-supplier=Digi-Key; ComponentLink1Description: http://www.vishay.com/docs/60024/pat.pdf?src-supplier=Digi-Key; Supplier Part Number 1: PAT400ACT-ND
footprint RES-0603
pins: 1, 2

## PMV65XP,215
designator Q?
MOSFET P-CH 20V 2.8A SOT-23; Manufacturer: Nexperia; Supplier 1: Digi-Key; Manufacturer Part Number: PMV65XP,215; Stock 1: 60287; Pricing 1: 1=0.38, 10=0.28, 25=0.2452, 100=0.133, 250=0.13232, 500=0.1085, 1000=0.0805 (USD); Supplier Part Number 1: 1727-3124-1-ND
footprint sot-23
pins: 1 G, 2 S, 3 D

## QRD1114
designator U?
SENSR OPTO TRANS 1.27MM REFL PCB; Manufacturer: ON Semiconductor / Fairchild; Manufacturer Part Number: QRD1113; Wavelength: 940nm; Forward Current: 50mA; Rise Time: 10000ns; Forward Voltage: 1.7V; Collector Emitter Voltage (VCEO): 30V; Max Collector Current: 300uA; Fall Time: 50000ns; Number of Channels: 1; Reverse Breakdown Voltage: 5V; Response Time: 50us; Power Dissipation: 100mW; Input Current: 20mA; Output Type: Phototransistor; Supplier 1: Digi-Key; Stock 1: 10; Pricing 1: 1=1.77, 5=1.706, 10=1.386, 25=1.194, 50=1.034, 100=0.9381, 500=0.78884, 1000=0.70356, 5000=0.6396 (USD); Mount: Through Hole; Number of Pins: 4; Weight: 0g; Contact Plating: Tin,Matte; Min Operating Temperature: -40°C; Max Operating Temperature: 85°C; Packaging: Bulk; Package Quantity: 100; Sensing Distance: 1.27mm; Collector-emitter Voltage-Max: 30V; Reverse Voltage (DC): 5V; Collector Emitter Breakdown Voltage: 30V; Number of Elements: 1; Operating Supply Voltage: 1.7V; Voltage Rating (DC): 30V; Radiation Hardening: No; Lead Free: Lead Free; REACH SVHC: No SVHC; RoHS Compliant: Yes; ComponentLink1URL: http://www.mouser.com/ds/2/149/QRD1113-196450.pdf?src-supplier=Mouser; ComponentLink1Description: http://www.mouser.com/ds/2/149/QRD1113-196450.pdf?src-supplier=Mouser; ComponentLink2URL: https://www.fairchildsemi.com/datasheets/QR/QRD1113.pdf?src-supplier=Avnet; ComponentLink2Description: https://www.fairchildsemi.com/datasheets/QR/QRD1113.pdf?src-supplier=Avnet; ComponentLink3URL: http://www1.futureelectronics.com/doc/FAIRCHILD/QRD1113.pdf?src-supplier=Future+Electronics; ComponentLink3Description: http://www1.futureelectronics.com/doc/FAIRCHILD/QRD1113.pdf?src-supplier=Future+Electronics; ComponentLink4URL: http://www.fairchildsemi.com/ds/QR/QRD1113.pdf?src-supplier=Avnet+Europe; ComponentLink4Description: http://www.fairchildsemi.com/ds/QR/QRD1113.pdf?src-supplier=Avnet+Europe; ComponentLink5URL: https://www.fairchildsemi.com/datasheets/QR/QRD1113.pdf?src-supplier=Digi-Key; ComponentLink5Description: https://www.fairchildsemi.com/datasheets/QR/QRD1113.pdf?src-supplier=Digi-Key; Supplier Part Number 1: QRD1113-ND
footprint QRD1114
pins: 1 C, 2 E, 3, 4

## RC0603FR-0754K9L
designator R?, comment 54.9K
RES SMD 54.9K OHM 1% 1/10W 0603; Manufacturer: Yageo; Manufacturer Part Number: RC0603FR-0754K9L; Resistance: 54.9kR; Power Rating: 100mW; Voltage Rating: 50V; Temperature Coefficient: 100ppm/°C; Working Voltage: 75V; Supplier 1: Digi-Key; Stock 1: 167189; Pricing 1: 1=0.1, 10=0.024, 100=0.0097, 1000=0.00436, 2500=0.00378 (USD); Case/Package: 0603; Case Code (Imperial): 0603; Case Code (Metric): 1608; Min Operating Temperature: -55°C; Max Operating Temperature: 155°C; Tolerance: 1%; Packaging: Tape and Reel; Termination: SMD/SMT; Resistor Type: Thick Film; Voltage Rating (DC): 50V; Number of Terminations: 2; Features: Moisture Resistant; Series: RC; Max Power Dissipation: 100mW; Construction: Rectangular; Technology: THICK FILM; Length: 1.6mm; Width: 0.8mm; Height: 0.45mm; Depth: 0.8mm; Military Standard: Not; Lead Free: Lead Free; RoHS Compliant: Yes; ComponentLink1URL: http://www.mouser.com/catalog/specsheets/RC0603.pdf?src-supplier=Mouser; ComponentLink1Description: http://www.mouser.com/catalog/specsheets/RC0603.pdf?src-supplier=Mouser; ComponentLink2URL: https://www.verical.com/server-webapp/html/getDatasheet?partID=37594&src-supplier=Verical; ComponentLink2Description: https://www.verical.com/server-webapp/html/getDatasheet?partID=37594&src-supplier=Verical; Supplier Part Number 1: 311-54.9KHRCT-ND
footprint RES-0603
pins: 1, 2

## RC0603FR-0760K4L
designator R?, comment 60.4K
RES SMD 60.4K OHM 1% 1/10W 0603; Manufacturer: Yageo; Manufacturer Part Number: RC0603FR-0760K4L; Power Rating: 100mW; Resistance: 60.4kR; Voltage Rating: 50V; Temperature Coefficient: 100ppm/°C; Supplier 1: Digi-Key; Stock 1: 50788; Pricing 1: 1=0.1, 10=0.024, 100=0.0097, 1000=0.00436, 2500=0.00378 (USD); Case/Package: 0603; Case Code (Imperial): 0603; Case Code (Metric): 1608; Size Code: 0603; Min Operating Temperature: -55°C; Max Operating Temperature: 155°C; Packaging: Tape and Reel; Package Quantity: 1; Tolerance: 1%; Termination: SMD/SMT; Resistor Type: Thick Film; Number of Terminations: 2; Max Power Dissipation: 100mW; Voltage Rating (DC): 50V; Features: Moisture Resistant; Series: RC; Construction: Rectangular; Length: 1.6mm; Width: 0.8mm; Height: 0.022inch; Depth: 0.8mm; Military Standard: Not; Lead Free: Lead Free; RoHS Compliant: Yes; ComponentLink1URL: http://www.yageo.com/documents/recent/PYu-RC_Group_51_RoHS_L_10.pdf?src-supplier=Digi-Key; ComponentLink1Description: http://www.yageo.com/documents/recent/PYu-RC_Group_51_RoHS_L_10.pdf?src-supplier=Digi-Key; ComponentLink2URL: http://www.mouser.com/catalog/specsheets/RC0603.pdf?src-supplier=Mouser; ComponentLink2Description: http://www.mouser.com/catalog/specsheets/RC0603.pdf?src-supplier=Mouser; Supplier Part Number 1: 311-60.4KHRDKR-ND
footprint RES-0603
pins: 1, 2

## RC0603FR-07453KL
designator R?, comment 453K
Res Thick Film 0603 453K Ohm 1% 1/10W ±100ppm/°C Molded SMD Paper T/R; Manufacturer: Yageo; Manufacturer Part Number: RC0603FR-07453KL; Resistance: 453kR; Power Rating: 100mW; Voltage Rating: 50V; Supplier 1: Arrow Electronics; RoHS: Yes; Category: Chip SMD Resistors; Stock 1: 507; Pricing 1: 1=0.03580, 10=0.01600, 25=0.01590, 100=0.00730, 500=0.00670 (USD); Case/Package: 0603; Contact Plating: Tin,Matte; Case Code (Imperial): 0603; Case Code (Metric): 1608; Size Code: 0603; Min Operating Temperature: -55°C; Max Operating Temperature: 155°C; Tolerance: 1%; Resistor Type: Thick Film; Temperature Coefficient: 100ppm/°C; Packaging: Tape and Reel; Termination: SMD/SMT; Voltage Rating (DC): 50V; Features: Moisture Resistant; Series: RC; Max Power Dissipation: 100mW; Number of Terminations: 2; Construction: Rectangular; Length: 1.6mm; Width: 0.8mm; Height: 0.45mm; Depth: 0.8mm; Military Standard: Not; Lead Free: Lead Free; RoHS Compliant: Yes; ComponentLink1URL: https://datasheet.ciiva.com/28390/pyu-rc0603-51-rohs-l-4-28390650.pdf?src-supplier=Avnet+Europe; ComponentLink1Description: https://datasheet.ciiva.com/28390/pyu-rc0603-51-rohs-l-4-28390650.pdf?src-supplier=Avnet+Europe; ComponentLink2URL: https://datasheet.ciiva.com/8885/pyu-rc0603-51-rohs-l-4-8885677.pdf?src-supplier=Avnet; ComponentLink2Description: https://datasheet.ciiva.com/8885/pyu-rc0603-51-rohs-l-4-8885677.pdf?src-supplier=Avnet; Supplier Part Number 1: RC0603FR-07453KL
footprint RES-0603
pins: 1, 2

## RCA0603100RFKEAHP
designator R?, comment 100R
RES SMD 100 OHM 1% 1/4W 0603; Manufacturer: Vishay Dale; Manufacturer Part Number: RCA0603100RFKEAHP; Max Power Dissipation: 250mW; Temperature Coefficient: 100ppm/°C; Supplier 1: Digi-Key; Stock 1: 0; Case/Package: 0603; Case Code (Imperial): 0603; Case Code (Metric): 1608; Min Operating Temperature: -55°C; Max Operating Temperature: 155°C; Resistor Type: Thick Film; Features: Automotive AEC-Q200,Anti-Sulfur; Packaging: Tape and Reel; Resistance: 100R; Tolerance: 1%; Number of Terminations: 2; RoHS Compliant: Yes; ComponentLink1URL: http://www.vishay.com/docs/20067/rcahp.pdf?src-supplier=Digi-Key; ComponentLink1Description: http://www.vishay.com/docs/20067/rcahp.pdf?src-supplier=Digi-Key; Supplier Part Number 1: 541-3244-2-ND
footprint RES-0603
pins: 1, 2

## RMCF0603FT5K10
designator R?, comment 5.1K
RES 5.1K OHM 1% 1/10W 0603; Manufacturer: Stackpole Electronics; Manufacturer Part Number: RMCF0603FT5K10; Resistance: 5.1kR; Max Power Dissipation: 100mW; Temperature Coefficient: 100ppm/°C; Supplier 1: Digi-Key; Stock 1: 58341; Pricing 1: 1=0.1, 10=0.017, 100=0.0068, 1000=0.00305, 2500=0.00264 (USD); Mount: Surface Mount; Case/Package: 0603; Case Code (Metric): 1608; Case Code (Imperial): 0603; Contact Plating: Tin,Matte; Min Operating Temperature: -55°C; Max Operating Temperature: 155°C; Tolerance: 1%; Packaging: Tape and Reel; Resistor Type: Thick Film; Number of Terminations: 2; Features: Automotive AEC-Q200; Series: RMCF; Length: 0.061inch; Width: 0.031inch; Height: 0.022inch; Radiation Hardening: No; RoHS Compliant: Yes; ComponentLink1URL: https://www.seielect.com/catalog/SEI-RMCF_RMCP.pdf?src-supplier=Avnet; ComponentLink1Description: https://www.seielect.com/catalog/SEI-RMCF_RMCP.pdf?src-supplier=Avnet; ComponentLink2URL: http://components.arrow.com/part/dataview/50863347S9465827N1174?src-supplier=Arrow+Electronics; ComponentLink2Description: http://components.arrow.com/part/dataview/50863347S9465827N1174?src-supplier=Arrow+Electronics; ComponentLink3URL: https://www.seielect.com/catalog/SEI-Packaging.pdf?src-supplier=Digi-Key; ComponentLink3Description: https://www.seielect.com/catalog/SEI-Packaging.pdf?src-supplier=Digi-Key; Supplier Part Number 1: RMCF0603FT5K10DKR-ND
footprint RES-0603
pins: 1, 2

## RMCF0603FT30K9
designator R?, comment 30.9K
RES 30.9K OHM 1% 1/10W 0603; Manufacturer: Stackpole Electronics; Manufacturer Part Number: RMCF0603FT30K9; Resistance: 30.9kR; Max Power Dissipation: 100mW; Temperature Coefficient: 100ppm/°C; Supplier 1: Digi-Key; Stock 1: 53990; Pricing 1: 1=0.1, 10=0.017, 100=0.0068, 1000=0.00305, 2500=0.00264 (USD); Mount: Surface Mount; Case/Package: 0603; Case Code (Metric): 1608; Case Code (Imperial): 0603; Contact Plating: Tin,Matte; Min Operating Temperature: -55°C; Max Operating Temperature: 155°C; Tolerance: 1%; Packaging: Tape and Reel; Resistor Type: Thick Film; Number of Terminations: 2; Features: Automotive AEC-Q200; Series: RMCF; Length: 0.061inch; Width: 0.031inch; Height: 0.022inch; Radiation Hardening: No; Lead Free: Lead Free; RoHS Compliant: Yes; ComponentLink1URL: https://www.seielect.com/catalog/SEI-RMCF_RMCP.pdf?src-supplier=Avnet; ComponentLink1Description: https://www.seielect.com/catalog/SEI-RMCF_RMCP.pdf?src-supplier=Avnet; ComponentLink2URL: https://www.seielect.com/catalog/SEI-Packaging.pdf?src-supplier=Digi-Key; ComponentLink2Description: https://www.seielect.com/catalog/SEI-Packaging.pdf?src-supplier=Digi-Key; ComponentLink3URL: https://www.seielect.com/Catalog/SEI-RMCF_RMCP.pdf?src-supplier=Digi-Key; ComponentLink3Description: https://www.seielect.com/Catalog/SEI-RMCF_RMCP.pdf?src-supplier=Digi-Key; Supplier Part Number 1: RMCF0603FT30K9CT-ND
footprint RES-0603
pins: 1, 2

## RT0603BRD071ML
designator R?, comment 1M
RES SMD 1M OHM 0.1% 1/10W 0603; Manufacturer: Yageo; Manufacturer Part Number: RT0603BRD071ML; Resistance: 1MR; Max Power Dissipation: 100mW; Temperature Coefficient: 25ppm/°C; Supplier 1: Digi-Key; Stock 1: 45971; Pricing 1: 1=0.3, 10=0.254, 100=0.0991, 1000=0.04149, 2500=0.03803 (USD); Case/Package: 0603; Min Operating Temperature: -55°C; Max Operating Temperature: 155°C; Packaging: Tape and Reel; Resistor Type: Thin Film; Number of Terminations: 2; Tolerance: 0.1%; Features: Moisture Resistant; Length: 0.063inch; Width: 0.031inch; Height: 0.022inch; RoHS Compliant: Yes; ComponentLink1URL: http://www.yageo.com/documents/recent/PYu-RT_1-to-0.01_RoHS_L_9.pdf?src-supplier=Digi-Key; ComponentLink1Description: http://www.yageo.com/documents/recent/PYu-RT_1-to-0.01_RoHS_L_9.pdf?src-supplier=Digi-Key; Supplier Part Number 1: YAG4498DKR-ND
footprint RES-0603
pins: 1, 2